# Altium footprint library Vibration_Datalogger.PcbLib: 76 footprints (part 2 of 5)
Each footprint in its own frame and in the unit in brackets; x right, y up, seen from the top. Pads: shape width x height; smd on the part's side, far side on the other; paste and mask are expansions set on the pad; w line width, h text height; cw(c..) or ccw(c..) is an arc to the next point about the centre after c.
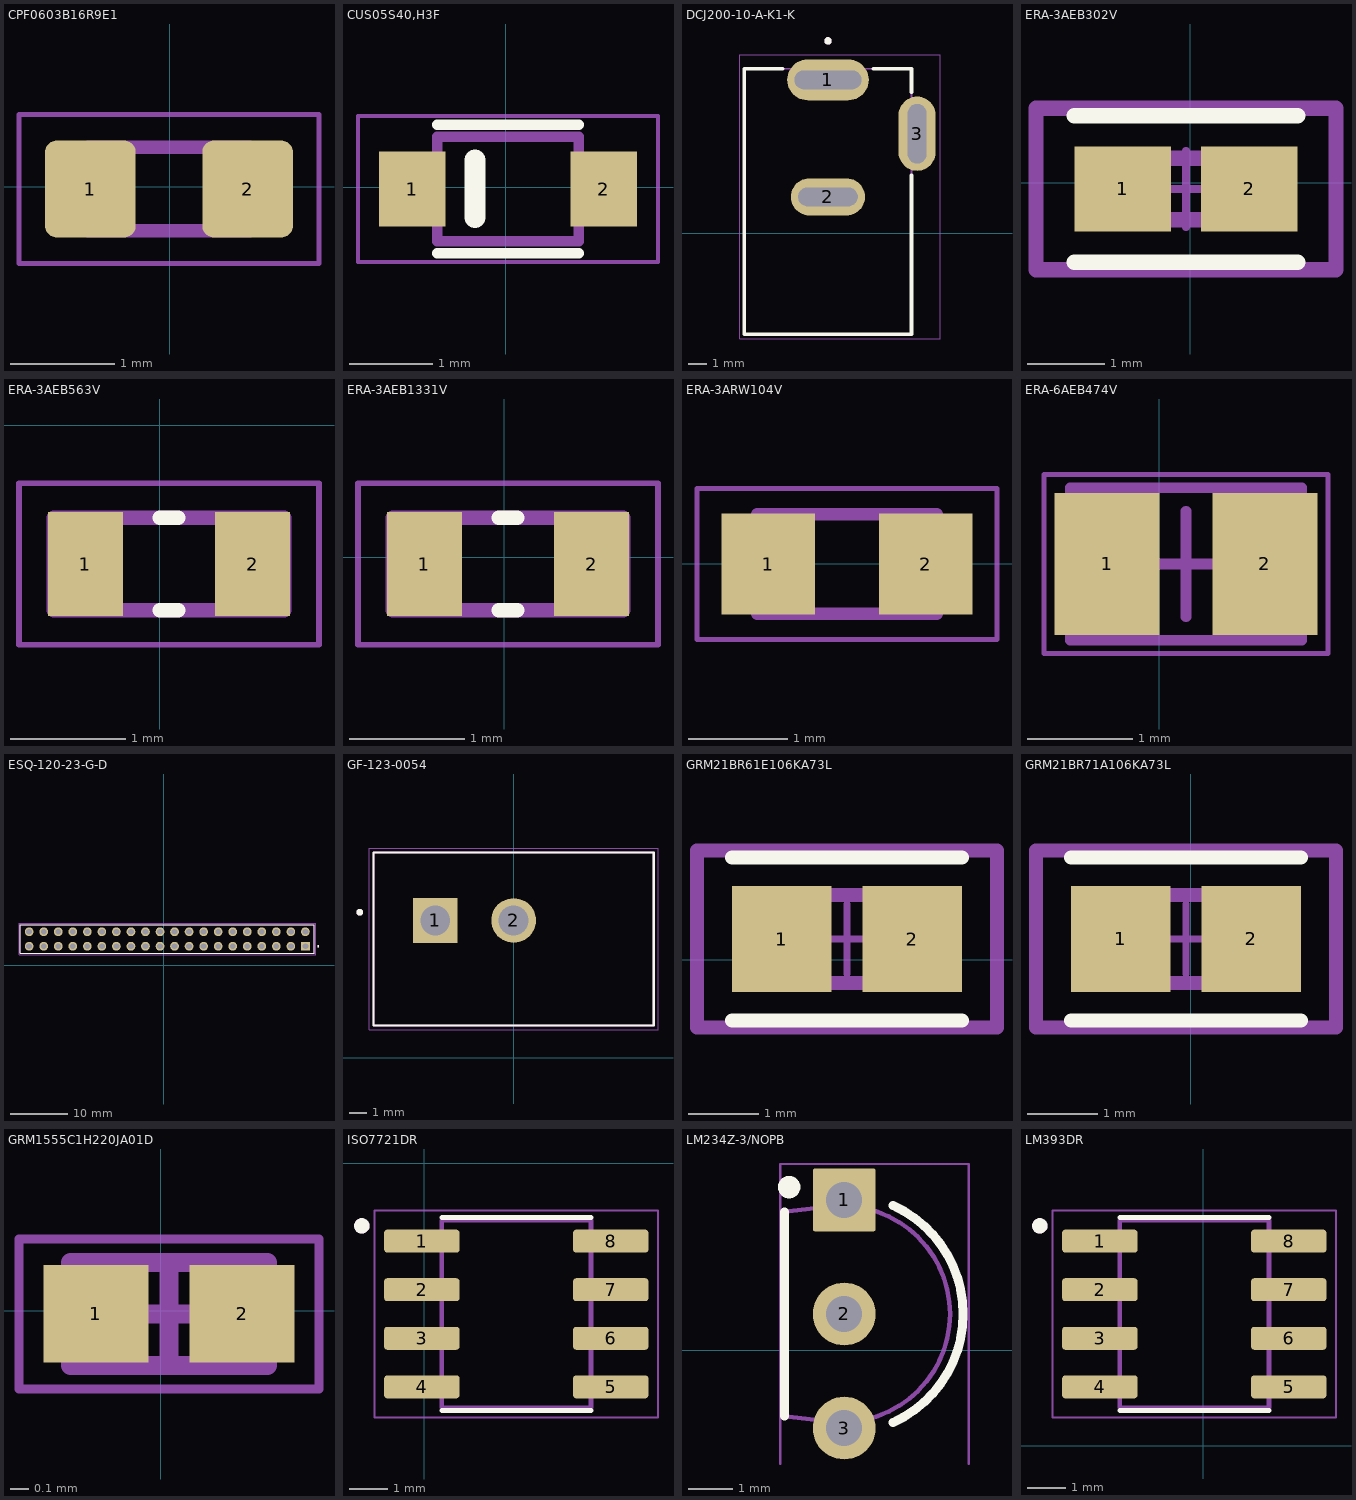
[diagram p1: the footprints below, top view; thin cyan lines are the x and y axes]

## CPF0603B16R9E1 [mm] "CMS CPF 0603 16R9 0.1% 25PPM"
pads (2):
  rrect25% 0.87x0.93 smd paste+0 mask+0.102: 1(-0.763,-0.021) 2(0.747,-0.021)
Mechanical 13:
  lines w0.127: -0.783,-0.421 -0.783,0.379 0.767,0.379 0.767,-0.421 -0.783,-0.421
Mechanical 15:
  lines w0.05: -1.448,-0.736 -1.448,0.694 1.432,0.694 1.432,-0.736 -1.448,-0.736
3D body "step_temp.STEP": height 0.55, standoff 0, extent -0.783,-0.421 0.767,0.379

## CUS05S40,H3F [mm] "DIODE SCHOTTKY 40V 500MA USC"
pads (2):
  rect 0.8x0.9 smd paste+0 mask+0.102: 1(-1.124,-0.019) 2(1.176,-0.019)
Top Overlay:
  lines w0.127: -0.824,-0.789 0.876,-0.789 ; -0.824,0.751 0.876,0.751
  lines w0.254: -0.37,-0.36 -0.37,0.33
Mechanical 13:
  lines w0.127: -0.824,-0.644 -0.824,0.606 0.876,0.606 0.876,-0.644 -0.824,-0.644
Mechanical 15:
  lines w0.05: -1.774,-0.894 1.826,-0.894 1.826,0.856 -1.774,0.856 -1.774,-0.894
3D body "CUS05S40,H3F.STEP": height 1.15, standoff 0, extent -1.2,-0.62 1.3,0.63

## DCJ200-10-A-K1-K [mm] "DC POWER JACK, THRU HOLE, HORIZO"
pads (3):
  oval 4.4x2.2 hole 1 slot 3.6 at 0 deg: 1(-11.948,8.261)
  oval 4x2 hole 1 slot 3.2 at 0 deg: 2(-11.948,1.961)
  oval 2x4 hole 1 slot 3.2 at 90 deg: 3(-7.148,5.361)
Top Overlay:
  circle w0.2: c-11.948,10.361 r0.1
  lines w0.2: -14.398,8.861 -16.448,8.861 -16.448,-5.439 -7.448,-5.439 -7.448,3.111 ; -9.498,8.861 -7.448,8.861 -7.448,7.611
Mechanical 13:
  circle w0.2: c-11.948,10.361 r0.1
  lines w0.1: -16.448,-5.439 -7.448,-5.439 -7.448,8.861 -16.448,8.861 -16.448,-5.439
Mechanical 15:
  lines w0.05: -16.698,-5.689 -16.698,9.611 -5.898,9.611 -5.898,-5.689 -16.698,-5.689
3D body "step_temp.STEP": height 11, standoff -3.5, extent -16.448,-5.439 -6.898,8.861

## ERA-3AEB302V [mm] "RES SMD 3K OHM 0.1% 1/10W 0603"
pads (2):
  rect 1.255x1.106 smd paste+0 mask+0: 1(-0.882,-0.078) 2(0.769,-0.078)
Top Overlay:
  lines w0.2: -1.51,-1.031 1.397,-1.031 ; -1.51,0.875 1.397,0.875
Mechanical 5:
  lines w0.2: -2.01,-1.131 1.897,-1.131 1.897,0.975 -2.01,0.975 -2.01,-1.131
  text ".Designator" at -2.22,1.388 h1
Mechanical 13:
  lines w0.2: -0.856,-0.478 0.744,-0.478 0.744,0.322 -0.856,0.322 -0.856,-0.478
Mechanical 15:
  lines w0.2: -2.01,-1.131 1.897,-1.131 1.897,0.975 -2.01,0.975 -2.01,-1.131
Mechanical 16:
  lines w0.1: -0.556,-0.078 0.444,-0.078 ; -0.056,-0.578 -0.056,0.422
3D body "Res_Panasonic_Electronic_Components_ERA-3ARB202V_eec.STEP": height 0.25, standoff 0, extent -2.01,-1.131 1.897,0.975

## ERA-3AEB563V [mm] "RES SMD 56K OHM 0.1% 1/10W 0603"
pads (2):
  rect 0.65x0.9 smd: 1(-0.647,-1.202) 2(0.803,-1.202)
Top Overlay:
  lines w0.127: -0.002,-1.602 0.158,-1.602 ; -0.002,-0.802 0.158,-0.802
Mechanical 13:
  lines w0.127: -0.922,-1.602 -0.922,-0.802 1.078,-0.802 1.078,-1.602 -0.922,-1.602
Mechanical 15:
  lines w0.05: -1.222,-1.902 -1.222,-0.502 1.378,-0.502 1.378,-1.902 -1.222,-1.902

## ERA-3AEB1331V [mm] "RES SMD 1.33KOHM 0.1% 1/10W 0603"
pads (2):
  rect 0.65x0.9 smd: 1(-0.692,-0.059) 2(0.758,-0.059)
Top Overlay:
  lines w0.127: -0.047,-0.459 0.113,-0.459 ; -0.047,0.341 0.113,0.341
Mechanical 13:
  lines w0.127: -0.967,-0.459 1.033,-0.459 1.033,0.341 -0.967,0.341 -0.967,-0.459
Mechanical 15:
  lines w0.05: -1.267,-0.759 1.333,-0.759 1.333,0.641 -1.267,0.641 -1.267,-0.759
3D body "ERA-3AEB1331V.STEP": height 0.45, standoff 0, extent -0.75,-0.37 0.85,0.43

## ERA-3ARW104V [mm] "RES SMD 100KOHM 0.05% 1/10W 0603"
pads (2):
  rect 0.94x1.02 smd paste+0 mask+0.102: 1(1.247,-0.001) 2(2.827,-0.001)
Mechanical 13:
  lines w0.127: 1.137,-0.501 2.937,-0.501 2.937,0.499 1.137,0.499 1.137,-0.501
Mechanical 15:
  lines w0.05: 0.529,-0.759 3.545,-0.759 3.545,0.757 0.529,0.757 0.529,-0.759
3D body "step_temp.STEP": height 0.45, standoff 0, extent 1.237,-0.401 2.837,0.399

## ERA-6AEB474V [mm] "RES SMD 470K OHM 0.1% 1/8W 0805"
pads (2):
  rect 1x1.35 smd: 1(-0.496,-2.079) 2(1.004,-2.079)
Mechanical 13:
  lines w0.1: -0.846,-2.804 -0.846,-1.354 1.354,-1.354 1.354,-2.804 -0.846,-2.804
Mechanical 15:
  lines w0.05: -1.096,-2.929 -1.096,-1.229 1.604,-1.229 1.604,-2.929 -1.096,-2.929
  lines w0.1: -0.246,-2.079 0.754,-2.079 ; 0.254,-2.579 0.254,-1.579
3D body: height 0.6, standoff 0, extent -0.446,-2.804 0.954,-1.354
3D body: height 0.6, standoff 0, extent -0.846,-2.804 -0.446,-1.354
3D body: height 0.6, standoff 0, extent 0.954,-2.804 1.354,-1.354

## ESQ-120-23-G-D [mm] "CONN SOCKET 40POS 0.1 GOLD PCB"
pads (40):
  rect 1.53x1.53 / inner round 1.53 / far side rect 1.53x1.53 hole 1.02 mask+0.102: 01(24.765,3.302)
  round 1.53 hole 1.02 mask+0.102: 02(24.765,5.842) 03(22.225,3.302) 04(22.225,5.842) 05(19.685,3.302) 06(19.685,5.842) 07(17.145,3.302) 08(17.145,5.842) 09(14.605,3.302) 10(14.605,5.842) 11(12.065,3.302) 12(12.065,5.842) 13(9.525,3.302) 14(9.525,5.842) 15(6.985,3.302) 16(6.985,5.842) 17(4.445,3.302) 18(4.445,5.842) 19(1.905,3.302) 20(1.905,5.842) 21(-0.635,3.302) 22(-0.635,5.842) 23(-3.175,3.302) 24(-3.175,5.842) 25(-5.715,3.302) 26(-5.715,5.842) 27(-8.255,3.302) 28(-8.255,5.842) 29(-10.795,3.302) 30(-10.795,5.842) 31(-13.335,3.302) 32(-13.335,5.842) 33(-15.875,3.302) 34(-15.875,5.842) 35(-18.415,3.302) 36(-18.415,5.842) 37(-20.955,3.302) 38(-20.955,5.842) 39(-23.495,3.302) 40(-23.495,5.842)
Top Overlay:
  circle w0.2: c27.04,3.302 r0.1
  lines w0.2: -25.02,2.097 26.29,2.097 26.29,7.047 -25.02,7.047 -25.02,2.097
Mechanical 13:
  circle w0.2: c27.04,3.302 r0.1
  lines w0.1: -25.02,2.097 26.29,2.097 26.29,7.047 -25.02,7.047 -25.02,2.097
Mechanical 15:
  lines w0.05: -25.27,1.847 -25.27,7.297 26.54,7.297 26.54,1.847 -25.27,1.847
3D body "ESQ-120-23-G-D.stp": height 13.59, standoff -4.83, extent -25.146,2.159 26.162,7.239

## GF-123-0054 [mm] "SWITCH SLIDE SPST 8.5A 125V"
pads (2):
  rect 2.625x2.625 hole 1.75: 1(-4.619,8.057)
  round 2.625 hole 1.75: 2(-0.019,8.057)
Top Overlay:
  circle w0.2: c-9.059,8.537 r0.1
  lines w0.127: 8.211,8.717 8.211,10.267 ; -8.249,1.887 -8.249,12.047 8.211,12.047 8.211,1.887 -8.249,1.887
Mechanical 13:
  circle w0.2: c-9.059,8.537 r0.1
  lines w0.127: -8.249,1.887 -8.249,12.047 8.211,12.047 8.211,1.887 -8.249,1.887
Mechanical 15:
  lines w0.05: -8.499,1.637 -8.499,12.297 8.461,12.297 8.461,1.637 -8.499,1.637
3D body "GF-123-0054--3DModel-STEP-56544.STEP": height 14.96, standoff -4.06, extent -8.122,1.634 8.338,11.794

## GRM21BR61E106KA73L [mm] "CAP CER 10UF 25V X5R 0805"
pads (2):
  rect 1.406x1.508 smd paste+0 mask+0: 1(3.011,0.294) 2(4.863,0.294)
Top Overlay:
  lines w0.2: 2.308,-0.86 5.566,-0.86 ; 2.308,1.448 5.566,1.448
Mechanical 5:
  lines w0.2: 1.808,-0.96 6.066,-0.96 6.066,1.548 1.808,1.548 1.808,-0.96
  text ".Designator" at 1.778,2.006 h1
Mechanical 13:
  lines w0.2: 2.937,-0.331 4.937,-0.331 4.937,0.919 2.937,0.919 2.937,-0.331
Mechanical 15:
  lines w0.2: 1.808,-0.96 6.066,-0.96 6.066,1.548 1.808,1.548 1.808,-0.96
Mechanical 16:
  lines w0.1: 3.437,0.294 4.437,0.294 ; 3.937,-0.206 3.937,0.794
3D body "Cap_Murata_GRM21BC81C106KA73L_eec.STEP": height 0.25, standoff 0, extent 1.808,-0.96 6.066,1.548

## GRM21BR71A106KA73L [mm] "CAP CER 10UF 10V X7R 0805"
pads (2):
  rect 1.406x1.508 smd paste+0 mask+0: 1(-0.995,2.52) 2(0.857,2.52)
Top Overlay:
  lines w0.2: -1.698,1.366 1.56,1.366 ; -1.698,3.674 1.56,3.674
Mechanical 5:
  lines w0.2: -2.198,1.266 -2.198,3.774 2.06,3.774 2.06,1.266 -2.198,1.266
  text ".Designator" at -2.228,4.105 h1
Mechanical 13:
  lines w0.2: -1.069,1.895 -1.069,3.145 0.931,3.145 0.931,1.895 -1.069,1.895
Mechanical 15:
  lines w0.2: -2.198,1.266 -2.198,3.774 2.06,3.774 2.06,1.266 -2.198,1.266
Mechanical 16:
  lines w0.1: -0.569,2.52 0.431,2.52 ; -0.069,2.02 -0.069,3.02
3D body "Cap_Murata_GRM21BC81C106KA73L_eec.STEP": height 0.25, standoff 0, extent -2.198,1.266 2.06,3.774

## GRM1555C1H220JA01D [mm] "CAP CER 22PF 50V C0G/NP0 0402"
pads (2):
  rect 0.56x0.52 smd: 1(-0.347,-0.017) 2(0.433,-0.017)
Mechanical 13:
  lines w0.1: -0.482,-0.292 0.568,-0.292 0.568,0.258 -0.482,0.258 -0.482,-0.292
Mechanical 15:
  lines w0.05: -0.757,-0.417 0.843,-0.417 0.843,0.383 -0.757,0.383 -0.757,-0.417
  lines w0.1: -0.232,-0.017 0.318,-0.017 ; 0.043,-0.292 0.043,0.258
3D body: height 0.55, standoff 0, extent 0.318,-0.292 0.568,0.258
3D body: height 0.55, standoff 0, extent -0.482,-0.292 -0.232,0.258
3D body: height 0.55, standoff 0, extent -0.232,-0.292 0.318,0.258

## ISO7721DR [mm] "DGTL ISOLTR 3KV 2CH GP 8-SOIC"
pads (8):
  rrect25% 1.97x0.6 smd: 1(-0.057,-2.032) 2(-0.057,-3.302) 3(-0.057,-4.572) 4(-0.057,-5.842) 5(4.883,-5.842) 6(4.883,-4.572) 7(4.883,-3.302) 8(4.883,-2.032)
Top Overlay:
  circle w0.2: c-1.627,-1.632 r0.1
  lines w0.127: 0.463,-6.462 4.363,-6.462 ; 0.463,-1.412 4.363,-1.412
Mechanical 13:
  circle w0.2: c-1.627,-1.632 r0.1
  lines w0.127: 0.463,-6.389 4.363,-6.389 4.363,-1.485 0.463,-1.485 0.463,-6.389
Mechanical 15:
  lines w0.05: -1.292,-6.639 6.118,-6.639 6.118,-1.235 -1.292,-1.235 -1.292,-6.639
3D body "step_temp.STEP": height 1.75, standoff 0, extent -0.582,-6.389 5.408,-1.485

## LM234Z-3/NOPB [mm] "IC CURRENT SOURCE 1% TO92-3"
pads (3):
  rrect7% 1.4x1.4 hole 0.8: 1(-8.763,3.352)
  round 1.4 hole 0.8: 2(-8.763,0.812) 3(-8.763,-1.728)
Top Overlay:
  circle w0.25: c-9.988,3.637 r0.125
  lines w0.2: -10.088,-1.461 -10.088,3.085 ; -7.671,-1.603 ccw(c-8.763,0.812) -7.671,3.227
Mechanical 1:
  text ".Designator" at -11.176,5.257 h0.76
Mechanical 13:
  lines w0.1: -8.568,-1.588 -8.568,-1.91 -8.568,-2.018 -8.948,-2.018 -8.948,-1.91 -8.948,-1.6 ; -8.568,3.212 -8.568,3.534 -8.568,3.642 -8.948,3.642 -8.948,3.534 -8.948,3.224 ; -8.948,-1.6 -10.088,-1.461 -10.088,3.085 -8.948,3.224 ; -8.948,-1.6 -8.818,-1.6 ccw(c-8.818,0.812) -8.818,3.224 -8.948,3.224
Mechanical 15:
  lines w0.05: -10.188,-2.528 -10.188,4.152 -5.988,4.152 -5.988,-2.528
  lines w0.1: -9.263,0.812 -8.263,0.812 ; -8.763,0.312 -8.763,1.312
3D body "LP0003B.stp": height 9.01, standoff -8.51, extent -10.096,-2.018 -6.414,3.642

## LM393DR [mm] "IC COMPARATOR 2 DIFF 8SOIC"
pads (8):
  rrect25% 1.97x0.6 smd paste+0 mask+0.102: 1(-2.706,5.355) 2(-2.706,4.085) 3(-2.706,2.815) 4(-2.706,1.545) 5(2.234,1.545) 6(2.234,2.815) 7(2.234,4.085) 8(2.234,5.355)
Top Overlay:
  circle w0.2: c-4.276,5.755 r0.1
  lines w0.127: -2.186,0.925 1.714,0.925 ; -2.186,5.975 1.714,5.975
Mechanical 13:
  circle w0.2: c-4.276,5.755 r0.1
  lines w0.127: -2.186,0.998 -2.186,5.903 1.714,5.903 1.714,0.998 -2.186,0.998
Mechanical 15:
  lines w0.05: -3.941,0.748 -3.941,6.152 3.469,6.152 3.469,0.748 -3.941,0.748
3D body "step_temp.STEP": height 1.75, standoff 0, extent -3.231,0.998 2.759,5.903